# EAGLE library part BQ25185DLHR (library BQ25185DLHR)
Battery Management NPI 1-CELL 1A STANDALONE LNR HRGR Source: Datasheet <https://www.ti.com/lit/ds/symlink/bq25185.pdf?ts=1706857561339&ref_url=https%3A%2F%2Fwww.ti.com%2Fproduct%2FBQ25185>
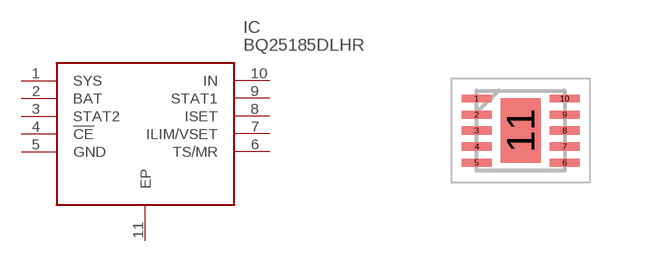
[diagram p0: symbol with the pads of SON40P220X200X80-11N; footprint SON40P220X200X80-11N]

Designator prefix IC

## BQ25185DLHR (Description: Battery Management NPI 1-CELL 1A STANDALONE LNR HRGR; Height: 0.8mm; Manufacturer_Name: Texas Instruments; Manufacturer_Part_Number: BQ25185DLHR; Mouser_Part_Number: 595-BQ25185DLHR; Mouser_Price-Stock: https://www.mouser.co.uk/ProductDetail/Texas-Instruments/BQ25185DLHR?qs=Z%252BL2brAPG1IbO%2FV3RqsaPw%3D%3D)  [SON40P220X200X80-11N]
1  SYS
2  BAT
3  STAT2
4  !CE
5  GND
6  TS/MR
7  ILIM/VSET
8  ISET
9  STAT1
10  IN
11  EP

## Footprint SON40P220X200X80-11N (pad centres in mm)
DLH0010A
smd 0.75 x 0.2: 1 -1.1,0.8; 2 -1.1,0.4; 3 -1.1,0; 4 -1.1,-0.4; 5 -1.1,-0.8; 6 1.1,-0.8; 7 1.1,-0.4; 8 1.1,0; 9 1.1,0.4; 10 1.1,0.8
smd 1 x 1.6: 11 0,0